# Altium footprint library LimeMicroAltiumLib.PcbLib: 876 footprints (part 17 of 57)
Each footprint in its own frame and in the unit in brackets; x right, y up, seen from the top. Pads: shape width x height; smd on the part's side, far side on the other; paste and mask are expansions set on the pad; w line width, h text height; cw(c..) or ccw(c..) is an arc to the next point about the centre after c.
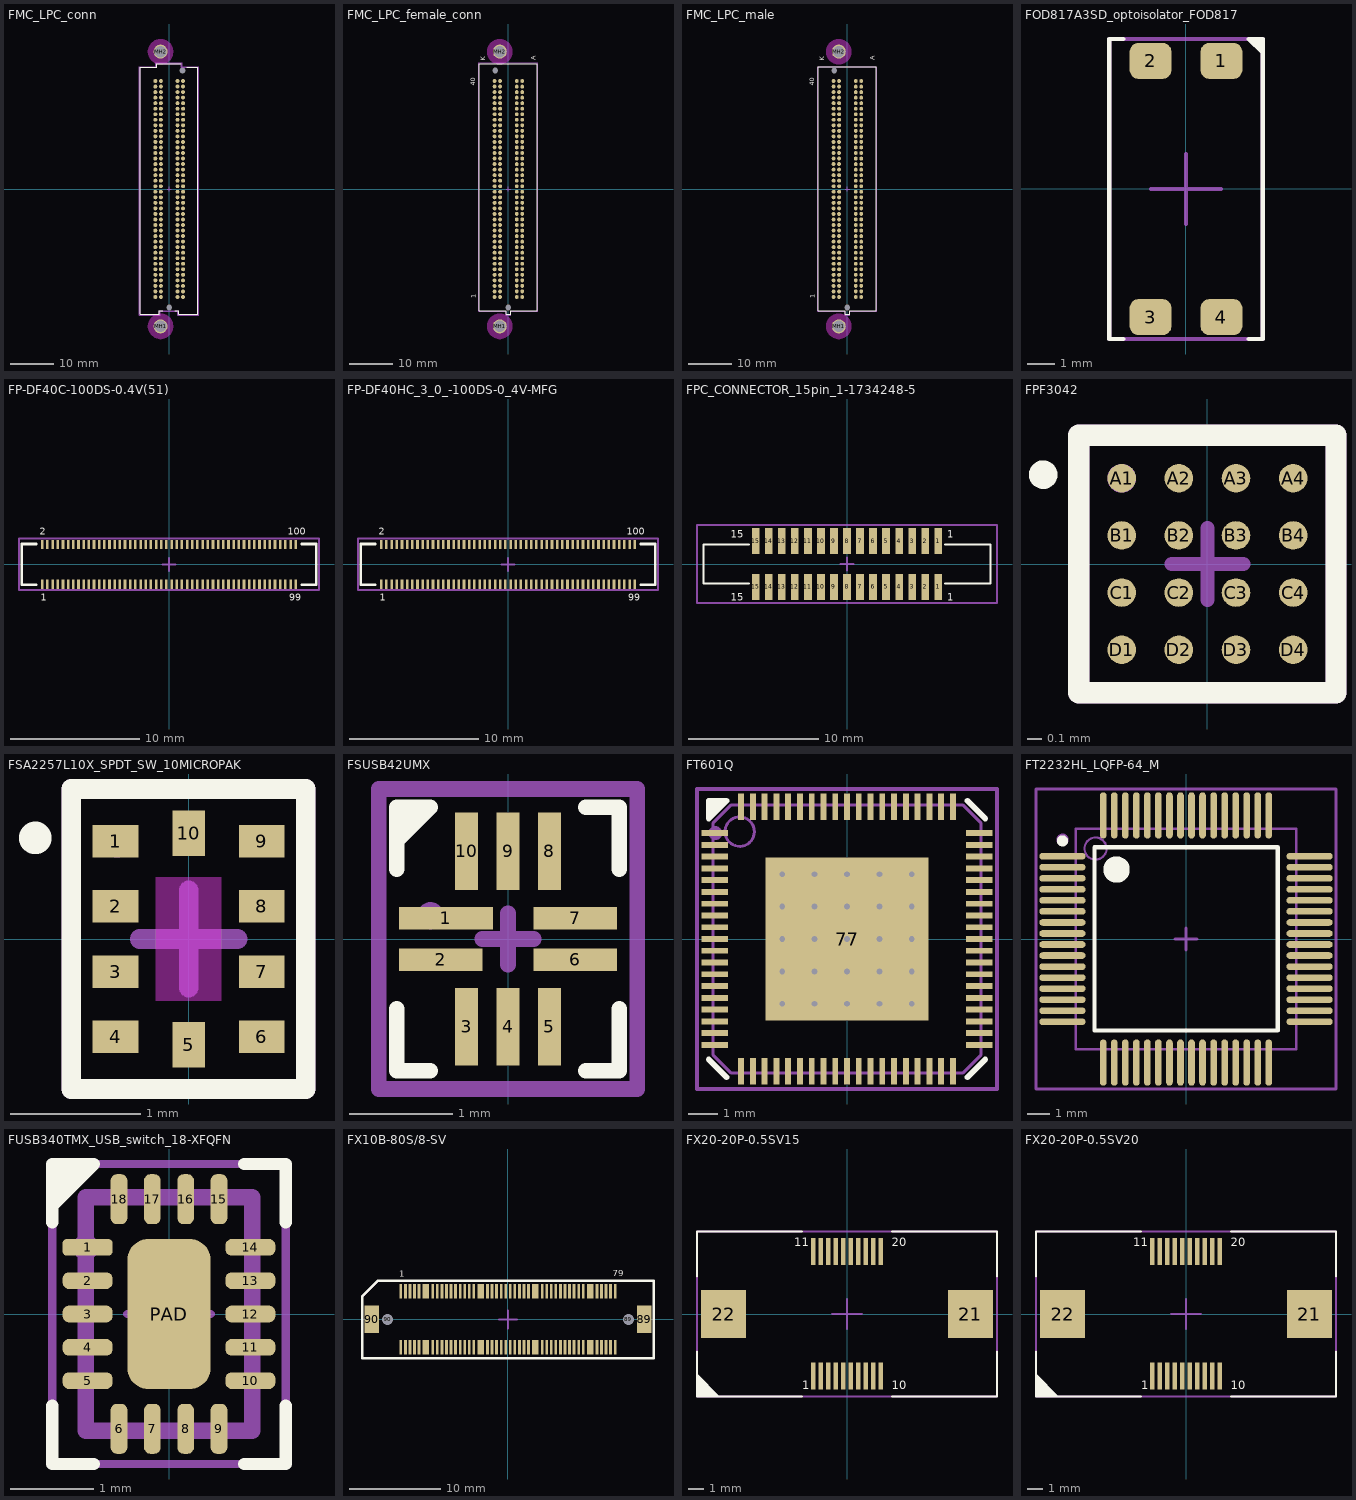
[diagram p16: the footprints below, top view; thin cyan lines are the x and y axes]

## FMC_LPC_conn [mm]
pads (164):
  round 0.9 smd: C1(3.175,24.765) C2(3.175,23.495) C3(3.175,22.225) C4(3.175,20.955) C5(3.175,19.685) C6(3.175,18.415) C7(3.175,17.145) C8(3.175,15.875) C9(3.175,14.605) C10(3.175,13.335) C11(3.175,12.065) C12(3.175,10.795) C13(3.175,9.525) C14(3.175,8.255) C15(3.175,6.985) C16(3.175,5.715) C17(3.175,4.445) C18(3.175,3.175) C19(3.175,1.905) C20(3.175,0.635) C21(3.175,-0.635) C22(3.175,-1.905) C23(3.175,-3.175) C24(3.175,-4.445) C25(3.175,-5.715) C26(3.175,-6.985) C27(3.175,-8.255) C28(3.175,-9.525) C29(3.175,-10.795) C30(3.175,-12.065) C31(3.175,-13.335) C32(3.175,-14.605) C33(3.175,-15.875) C34(3.175,-17.145) C35(3.175,-18.415) C36(3.175,-19.685) C37(3.175,-20.955) C38(3.175,-22.225) C39(3.175,-23.495) C40(3.175,-24.765) D1(1.905,24.765) D2(1.905,23.495) D3(1.905,22.225) D4(1.905,20.955) D5(1.905,19.685) D6(1.905,18.415) D7(1.905,17.145) D8(1.905,15.875) D9(1.905,14.605) D10(1.905,13.335) D11(1.905,12.065) D12(1.905,10.795) D13(1.905,9.525) D14(1.905,8.255) D15(1.905,6.985) D16(1.905,5.715) D17(1.905,4.445) D18(1.905,3.175) D19(1.905,1.905) D20(1.905,0.635) D21(1.905,-0.635) D22(1.905,-1.905) D23(1.905,-3.175) D24(1.905,-4.445) D25(1.905,-5.715) D26(1.905,-6.985) D27(1.905,-8.255) D28(1.905,-9.525) D29(1.905,-10.795) D30(1.905,-12.065) D31(1.905,-13.335) D32(1.905,-14.605) D33(1.905,-15.875) D34(1.905,-17.145) D35(1.905,-18.415) D36(1.905,-19.685) D37(1.905,-20.955) D38(1.905,-22.225) D39(1.905,-23.495) D40(1.905,-24.765) G1(-1.905,24.765) G2(-1.905,23.495) G3(-1.905,22.225) G4(-1.905,20.955) G5(-1.905,19.685) G6(-1.905,18.415) G7(-1.905,17.145) G8(-1.905,15.875) G9(-1.905,14.605) G10(-1.905,13.335) G11(-1.905,12.065) G12(-1.905,10.795) G13(-1.905,9.525) G14(-1.905,8.255) G15(-1.905,6.985) G16(-1.905,5.715) G17(-1.905,4.445) G18(-1.905,3.175) G19(-1.905,1.905) G20(-1.905,0.635) G21(-1.905,-0.635) G22(-1.905,-1.905) G23(-1.905,-3.175) G24(-1.905,-4.445) G25(-1.905,-5.715) G26(-1.905,-6.985) G27(-1.905,-8.255) G28(-1.905,-9.525) G29(-1.905,-10.795) G30(-1.905,-12.065) G31(-1.905,-13.335) G32(-1.905,-14.605) G33(-1.905,-15.875) G34(-1.905,-17.145) G35(-1.905,-18.415) G36(-1.905,-19.685) G37(-1.905,-20.955) G38(-1.905,-22.225) G39(-1.905,-23.495) G40(-1.905,-24.765) H1(-3.175,24.765) H2(-3.175,23.495) H3(-3.175,22.225) H4(-3.175,20.955) H5(-3.175,19.685) H6(-3.175,18.415) H7(-3.175,17.145) H8(-3.175,15.875) H9(-3.175,14.605) H10(-3.175,13.335) H11(-3.175,12.065) H12(-3.175,10.795) H13(-3.175,9.525) H14(-3.175,8.255) H15(-3.175,6.985) H16(-3.175,5.715) H17(-3.175,4.445) H18(-3.175,3.175) H19(-3.175,1.905) H20(-3.175,0.635) H21(-3.175,-0.635) H22(-3.175,-1.905) H23(-3.175,-3.175) H24(-3.175,-4.445) H25(-3.175,-5.715) H26(-3.175,-6.985) H27(-3.175,-8.255) H28(-3.175,-9.525) H29(-3.175,-10.795) H30(-3.175,-12.065) H31(-3.175,-13.335) H32(-3.175,-14.605) H33(-3.175,-15.875) H34(-3.175,-17.145) H35(-3.175,-18.415) H36(-3.175,-19.685) H37(-3.175,-20.955) H38(-3.175,-22.225) H39(-3.175,-23.495) H40(-3.175,-24.765)
  round 3.2 hole 2.7: MH1(-1.98,-31.5) MH2(-1.98,31.5)
  round 0.97 hole 1.27 unplated: MH1(0,-27.18) MH2(3.05,27.18)
Top Layer keep-out:
  region: -1.98,-34.4 -2.17,-34.4 -2.547,-34.35 -2.914,-34.252 -3.265,-34.107 -3.595,-33.916 -3.896,-33.685 -4.165,-33.416 -4.396,-33.115 -4.587,-32.785 -4.732,-32.434 -4.83,-32.067 -4.88,-31.69 -4.88,-31.5 -4.88,-31.31 -4.83,-30.933 -4.732,-30.566 -4.587,-30.215 -4.396,-29.885 -4.165,-29.584 -3.896,-29.315 -3.595,-29.084 -3.265,-28.893 -2.914,-28.748 -2.547,-28.65 -2.17,-28.6 -1.98,-28.6 -1.79,-28.6 -1.413,-28.65 -1.046,-28.748 -0.695,-28.893 -0.365,-29.084 -0.064,-29.315 0.205,-29.584 0.436,-29.885 0.627,-30.215 0.772,-30.566 0.87,-30.933 0.92,-31.31 0.92,-31.5 0.92,-31.69 0.87,-32.067 0.772,-32.434 0.627,-32.785 0.436,-33.115 0.205,-33.416 -0.064,-33.685 -0.365,-33.916 -0.695,-34.107 -1.046,-34.252 -1.413,-34.35 -1.79,-34.4
  region: -1.98,28.6 -2.17,28.6 -2.547,28.65 -2.914,28.748 -3.265,28.893 -3.595,29.084 -3.896,29.315 -4.165,29.584 -4.396,29.885 -4.587,30.215 -4.732,30.566 -4.83,30.933 -4.88,31.31 -4.88,31.5 -4.88,31.69 -4.83,32.067 -4.732,32.434 -4.587,32.785 -4.396,33.115 -4.165,33.416 -3.896,33.685 -3.595,33.916 -3.265,34.107 -2.914,34.252 -2.547,34.35 -2.17,34.4 -1.98,34.4 -1.79,34.4 -1.413,34.35 -1.046,34.252 -0.695,34.107 -0.365,33.916 -0.064,33.685 0.205,33.416 0.436,33.115 0.627,32.785 0.772,32.434 0.87,32.067 0.92,31.69 0.92,31.5 0.92,31.31 0.87,30.933 0.772,30.566 0.627,30.215 0.436,29.885 0.205,29.584 -0.064,29.315 -0.365,29.084 -0.695,28.893 -1.046,28.748 -1.413,28.65 -1.79,28.6
Top Overlay:
  lines w0.2: -6.662,-28.727 -6.662,27.89 ; -6.66,-28.727 -2.241,-28.727 -2.241,-27.889 -1.5,-27.889 ; -6.66,27.889 -2.888,27.889 -2.888,28.727 2.801,28.727 ; 1.25,-27.889 2.153,-27.889 2.153,-28.727 6.574,-28.727 ; 4,27.889 6.573,27.889 6.573,-28.727
Mechanical 13:
  lines w0.1: -6.662,-28.727 -6.662,27.89 ; -6.66,-28.727 -2.241,-28.727 -2.241,-27.889 2.153,-27.889 2.153,-28.727 6.574,-28.727 ; -6.66,27.889 -2.888,27.889 -2.888,28.727 2.801,28.727 2.801,27.889 6.573,27.889 6.573,-28.727
Mechanical 15:
  lines w0.15: -0.5,0 0.5,0 ; 0,-0.5 0,0.5 ; -6.862,-28.927 -2.041,-28.927 -2.041,-28.089 1.953,-28.089 1.953,-28.927 6.773,-28.927 6.773,28.089 3.001,28.089 3.001,28.927 -3.088,28.927 -3.088,28.089 -6.862,28.089 -6.862,-28.927
  text ".Designator" at 0,0 h0.55
3D body: height 2, standoff 0.25, extent -0.806,-27.889 0.718,-26.492
3D body: height 0.73, standoff -1.27, extent -0.61,-27.736 0.508,-26.62
3D body: height 6.55, standoff 2.16, extent 3.281,25.019 4.252,25.502
3D body: height 6.55, standoff 2.16, extent 3.281,23.749 4.252,24.511
3D body: height 6.55, standoff 2.16, extent 3.281,22.479 4.252,23.241
3D body: height 6.55, standoff 2.16, extent 3.281,21.209 4.252,21.971
3D body: height 6.55, standoff 2.16, extent 3.281,19.939 4.252,20.701
3D body: height 6.55, standoff 2.16, extent 3.281,18.669 4.252,19.431
3D body: height 6.55, standoff 2.16, extent 3.281,17.399 4.252,18.161
3D body: height 6.55, standoff 2.16, extent 3.281,16.129 4.252,16.891
3D body: height 6.55, standoff 2.16, extent 3.281,14.859 4.252,15.621
3D body: height 6.55, standoff 2.16, extent 3.281,13.589 4.252,14.351
3D body: height 6.55, standoff 2.16, extent 3.281,12.319 4.252,13.081
3D body: height 6.55, standoff 2.16, extent 3.281,11.049 4.252,11.811
3D body: height 6.55, standoff 2.16, extent 3.281,9.779 4.252,10.541
3D body: height 6.55, standoff 2.16, extent 3.281,8.509 4.252,9.271
3D body: height 6.55, standoff 2.16, extent 3.281,7.239 4.252,8.001
3D body: height 6.55, standoff 2.16, extent 3.281,5.969 4.252,6.731
3D body: height 6.55, standoff 2.16, extent 3.281,4.699 4.252,5.461
3D body: height 6.55, standoff 2.16, extent 3.281,3.429 4.252,4.191
3D body: height 6.55, standoff 2.16, extent 3.281,2.159 4.252,2.921
3D body: height 6.55, standoff 2.16, extent 3.281,0.889 4.252,1.651
3D body: height 6.55, standoff 2.16, extent 3.281,-0.381 4.252,0.381
3D body: height 6.55, standoff 2.16, extent 3.281,-1.651 4.252,-0.889
3D body: height 6.55, standoff 2.16, extent 3.281,-2.921 4.252,-2.159
3D body: height 6.55, standoff 2.16, extent 3.281,-4.191 4.252,-3.429
3D body: height 6.55, standoff 2.16, extent 3.281,-5.461 4.252,-4.699
3D body: height 6.55, standoff 2.16, extent 3.281,-6.731 4.252,-5.969
3D body: height 6.55, standoff 2.16, extent 3.281,-8.001 4.252,-7.239
3D body: height 6.55, standoff 2.16, extent 3.281,-9.271 4.252,-8.509
3D body: height 6.55, standoff 2.16, extent 3.281,-10.541 4.252,-9.779
3D body: height 6.55, standoff 2.16, extent 3.281,-11.811 4.252,-11.049
3D body: height 6.55, standoff 2.16, extent 3.281,-13.081 4.252,-12.319
3D body: height 6.55, standoff 2.16, extent 3.281,-14.351 4.252,-13.589
3D body: height 6.55, standoff 2.16, extent 3.281,-15.621 4.252,-14.859
3D body: height 6.55, standoff 2.16, extent 3.281,-16.891 4.252,-16.129
3D body: height 6.55, standoff 2.16, extent 3.281,-18.161 4.252,-17.399
3D body: height 6.55, standoff 2.16, extent 3.281,-19.431 4.252,-18.669
3D body: height 6.55, standoff 2.16, extent 3.281,-20.701 4.252,-19.939
3D body: height 6.55, standoff 2.16, extent 3.281,-21.971 4.252,-21.209
3D body: height 6.55, standoff 2.16, extent 3.281,-23.241 4.252,-22.479
3D body: height 6.55, standoff 2.16, extent 3.281,-24.511 4.252,-23.749
3D body: height 2, standoff 0.51, extent -5.771,26.493 -3.853,27.255
3D body: height 2, standoff 0.51, extent 3.766,26.492 5.685,27.254
3D body: height 2, standoff 0, extent -3.854,26.492 -2.33,27.889
3D body: height 2, standoff 0, extent -0.806,26.492 0.718,27.889
3D body: height 2, standoff 0.25, extent 2.242,26.492 3.766,27.889
3D body: height 6.55, standoff 1.92, extent -6.662,27.053 6.571,28.729
3D body: height 2, standoff 0.51, extent -6.279,-27.889 5.684,-26.492
3D body: height 6.55, standoff 0, extent 5.685,-27.889 6.573,-26.493
3D body: height 2, standoff 0, extent 2.242,-27.889 3.766,-26.492
3D body: height 2, standoff 0, extent -3.854,-27.889 -2.33,-26.492
3D body: height 6.55, standoff 0, extent -6.66,-27.889 -5.772,-26.493
3D body: height 6.55, standoff 1.92, extent -6.659,-28.727 6.574,-27.052
3D body: height 6.55, standoff 0, extent 5.685,26.493 6.573,27.889
3D body: height 6.55, standoff 0, extent -6.662,26.494 -5.774,27.89
3D body: height 2, standoff 0.51, extent -3.854,26.492 3.766,27.889
3D body: height 6.55, standoff 2.16, extent 3.281,-25.502 4.252,-25.019
3D body: height 6.55, standoff 2.16, extent 0.741,-25.502 1.712,-25.019
3D body: height 6.55, standoff 2.16, extent 0.741,-24.511 1.712,-23.749
3D body: height 6.55, standoff 2.16, extent 0.741,-23.241 1.712,-22.479
3D body: height 6.55, standoff 2.16, extent 0.741,-21.971 1.712,-21.209
3D body: height 6.55, standoff 2.16, extent 0.741,-20.701 1.712,-19.939
3D body: height 6.55, standoff 2.16, extent 0.741,-19.431 1.712,-18.669
3D body: height 6.55, standoff 2.16, extent 0.741,-18.161 1.712,-17.399
3D body: height 6.55, standoff 2.16, extent 0.741,-16.891 1.712,-16.129
3D body: height 6.55, standoff 2.16, extent 0.741,-15.621 1.712,-14.859
3D body: height 6.55, standoff 2.16, extent 0.741,-14.351 1.712,-13.589
3D body: height 6.55, standoff 2.16, extent 0.741,-13.081 1.712,-12.319
3D body: height 6.55, standoff 2.16, extent 0.741,-11.811 1.712,-11.049
3D body: height 6.55, standoff 2.16, extent 0.741,-10.541 1.712,-9.779
3D body: height 6.55, standoff 2.16, extent 0.741,-9.271 1.712,-8.509
3D body: height 6.55, standoff 2.16, extent 0.741,-8.001 1.712,-7.239
3D body: height 6.55, standoff 2.16, extent 0.741,-6.731 1.712,-5.969
3D body: height 6.55, standoff 2.16, extent 0.741,-5.461 1.712,-4.699
3D body: height 6.55, standoff 2.16, extent 0.741,-4.191 1.712,-3.429
3D body: height 6.55, standoff 2.16, extent 0.741,-2.921 1.712,-2.159
3D body: height 6.55, standoff 2.16, extent 0.741,-1.651 1.712,-0.889
3D body: height 6.55, standoff 2.16, extent 0.741,-0.381 1.712,0.381
3D body: height 6.55, standoff 2.16, extent 0.741,0.889 1.712,1.651
3D body: height 6.55, standoff 2.16, extent 0.741,2.159 1.712,2.921
3D body: height 6.55, standoff 2.16, extent 0.741,3.429 1.712,4.191
3D body: height 6.55, standoff 2.16, extent 0.741,4.699 1.712,5.461
3D body: height 6.55, standoff 2.16, extent 0.741,5.969 1.712,6.731
3D body: height 6.55, standoff 2.16, extent 0.741,7.239 1.712,8.001
3D body: height 6.55, standoff 2.16, extent 0.741,8.509 1.712,9.271
3D body: height 6.55, standoff 2.16, extent 0.741,9.779 1.712,10.541
3D body: height 6.55, standoff 2.16, extent 0.741,11.049 1.712,11.811
3D body: height 6.55, standoff 2.16, extent 0.741,12.319 1.712,13.081
3D body: height 6.55, standoff 2.16, extent 0.741,13.589 1.712,14.351
3D body: height 6.55, standoff 2.16, extent 0.741,14.859 1.712,15.621
3D body: height 6.55, standoff 2.16, extent 0.741,16.129 1.712,16.891
3D body: height 6.55, standoff 2.16, extent 0.741,17.399 1.712,18.161
3D body: height 6.55, standoff 2.16, extent 0.741,18.669 1.712,19.431
3D body: height 6.55, standoff 2.16, extent 0.741,19.939 1.712,20.701
3D body: height 6.55, standoff 2.16, extent 0.741,21.209 1.712,21.971
3D body: height 6.55, standoff 2.16, extent 0.741,22.479 1.712,23.241
3D body: height 6.55, standoff 2.16, extent 0.741,23.749 1.712,24.511
3D body: height 6.55, standoff 2.16, extent 0.741,25.019 1.712,25.502
3D body: height 6.24, standoff 2.16, extent 1.157,-25.019 1.296,25.019
3D body: height 6.55, standoff 2.16, extent -1.799,-25.502 -0.828,-25.019
3D body: height 6.55, standoff 2.16, extent -1.799,-24.511 -0.828,-23.749
3D body: height 6.55, standoff 2.16, extent -1.799,-23.241 -0.828,-22.479
3D body: height 6.55, standoff 2.16, extent -1.799,-21.971 -0.828,-21.209
3D body: height 6.55, standoff 2.16, extent -1.799,-20.701 -0.828,-19.939
3D body: height 6.55, standoff 2.16, extent -1.799,-19.431 -0.828,-18.669
3D body: height 6.55, standoff 2.16, extent -1.799,-18.161 -0.828,-17.399
3D body: height 6.55, standoff 2.16, extent -1.799,-16.891 -0.828,-16.129
3D body: height 6.55, standoff 2.16, extent -1.799,-15.621 -0.828,-14.859
3D body: height 6.55, standoff 2.16, extent -1.799,-14.351 -0.828,-13.589
3D body: height 6.55, standoff 2.16, extent -1.799,-13.081 -0.828,-12.319
3D body: height 6.55, standoff 2.16, extent -1.799,-11.811 -0.828,-11.049
3D body: height 6.55, standoff 2.16, extent -1.799,-10.541 -0.828,-9.779
3D body: height 6.55, standoff 2.16, extent -1.799,-9.271 -0.828,-8.509
3D body: height 6.55, standoff 2.16, extent -1.799,-8.001 -0.828,-7.239
3D body: height 6.55, standoff 2.16, extent -1.799,-6.731 -0.828,-5.969
3D body: height 6.55, standoff 2.16, extent -1.799,-5.461 -0.828,-4.699
3D body: height 6.55, standoff 2.16, extent -1.799,-4.191 -0.828,-3.429
3D body: height 6.55, standoff 2.16, extent -1.799,-2.921 -0.828,-2.159
3D body: height 6.55, standoff 2.16, extent -1.799,-1.651 -0.828,-0.889
3D body: height 6.55, standoff 2.16, extent -1.799,-0.381 -0.828,0.381
3D body: height 6.55, standoff 2.16, extent -1.799,0.889 -0.828,1.651
3D body: height 6.55, standoff 2.16, extent -1.799,2.159 -0.828,2.921
3D body: height 6.55, standoff 2.16, extent -1.799,3.429 -0.828,4.191
3D body: height 6.55, standoff 2.16, extent -1.799,4.699 -0.828,5.461
3D body: height 6.55, standoff 2.16, extent -1.799,5.969 -0.828,6.731
3D body: height 6.55, standoff 2.16, extent -1.799,7.239 -0.828,8.001
3D body: height 6.55, standoff 2.16, extent -1.799,8.509 -0.828,9.271
3D body: height 6.55, standoff 2.16, extent -1.799,9.779 -0.828,10.541
3D body: height 6.55, standoff 2.16, extent -1.799,11.049 -0.828,11.811
3D body: height 6.55, standoff 2.16, extent -1.799,12.319 -0.828,13.081
3D body: height 6.55, standoff 2.16, extent -1.799,13.589 -0.828,14.351
3D body: height 6.55, standoff 2.16, extent -1.799,14.859 -0.828,15.621
3D body: height 6.55, standoff 2.16, extent -1.799,16.129 -0.828,16.891
3D body: height 6.55, standoff 2.16, extent -1.799,17.399 -0.828,18.161
3D body: height 6.55, standoff 2.16, extent -1.799,18.669 -0.828,19.431
3D body: height 6.55, standoff 2.16, extent -1.799,19.939 -0.828,20.701
3D body: height 6.55, standoff 2.16, extent -1.799,21.209 -0.828,21.971
3D body: height 6.55, standoff 2.16, extent -1.799,22.479 -0.828,23.241
3D body: height 6.55, standoff 2.16, extent -1.799,23.749 -0.828,24.511
3D body: height 6.55, standoff 2.16, extent -1.799,25.019 -0.828,25.502
3D body: height 6.24, standoff 2.16, extent -1.383,-25.019 -1.244,25.019
3D body: height 6.55, standoff 2.16, extent -4.339,-25.502 -3.368,-25.019
3D body: height 6.55, standoff 2.16, extent -4.339,-24.511 -3.368,-23.749
3D body: height 6.55, standoff 2.16, extent -4.339,-23.241 -3.368,-22.479
3D body: height 6.55, standoff 2.16, extent -4.339,-21.971 -3.368,-21.209
3D body: height 6.55, standoff 2.16, extent -4.339,-20.701 -3.368,-19.939
3D body: height 6.55, standoff 2.16, extent -4.339,-19.431 -3.368,-18.669
3D body: height 6.55, standoff 2.16, extent -4.339,-18.161 -3.368,-17.399
3D body: height 6.55, standoff 2.16, extent -4.339,-16.891 -3.368,-16.129
3D body: height 6.55, standoff 2.16, extent -4.339,-15.621 -3.368,-14.859
3D body: height 6.55, standoff 2.16, extent -4.339,-14.351 -3.368,-13.589
3D body: height 6.55, standoff 2.16, extent -4.339,-13.081 -3.368,-12.319
3D body: height 6.55, standoff 2.16, extent -4.339,-11.811 -3.368,-11.049
3D body: height 6.55, standoff 2.16, extent -4.339,-10.541 -3.368,-9.779
3D body: height 6.55, standoff 2.16, extent -4.339,-9.271 -3.368,-8.509
3D body: height 6.55, standoff 2.16, extent -4.339,-8.001 -3.368,-7.239
3D body: height 6.55, standoff 2.16, extent -4.339,-6.731 -3.368,-5.969
3D body: height 6.55, standoff 2.16, extent -4.339,-5.461 -3.368,-4.699
3D body: height 6.55, standoff 2.16, extent -4.339,-4.191 -3.368,-3.429
3D body: height 6.55, standoff 2.16, extent -4.339,-2.921 -3.368,-2.159
3D body: height 6.55, standoff 2.16, extent -4.339,-1.651 -3.368,-0.889
3D body: height 6.55, standoff 2.16, extent -4.339,-0.381 -3.368,0.381
3D body: height 6.55, standoff 2.16, extent -4.339,0.889 -3.368,1.651
3D body: height 6.55, standoff 2.16, extent -4.339,2.159 -3.368,2.921
3D body: height 6.55, standoff 2.16, extent -4.339,3.429 -3.368,4.191
3D body: height 6.55, standoff 2.16, extent -4.339,4.699 -3.368,5.461
3D body: height 6.55, standoff 2.16, extent -4.339,5.969 -3.368,6.731
3D body: height 6.55, standoff 2.16, extent -4.339,7.239 -3.368,8.001
3D body: height 6.55, standoff 2.16, extent -4.339,8.509 -3.368,9.271
3D body: height 6.55, standoff 2.16, extent -4.339,9.779 -3.368,10.541
3D body: height 6.55, standoff 2.16, extent -4.339,11.049 -3.368,11.811
3D body: height 6.55, standoff 2.16, extent -4.339,12.319 -3.368,13.081
3D body: height 6.55, standoff 2.16, extent -4.339,13.589 -3.368,14.351
3D body: height 6.55, standoff 2.16, extent -4.339,14.859 -3.368,15.621
3D body: height 6.55, standoff 2.16, extent -4.339,16.129 -3.368,16.891
3D body: height 6.55, standoff 2.16, extent -4.339,17.399 -3.368,18.161
3D body: height 6.55, standoff 2.16, extent -4.339,18.669 -3.368,19.431
3D body: height 6.55, standoff 2.16, extent -4.339,19.939 -3.368,20.701
3D body: height 6.55, standoff 2.16, extent -4.339,21.209 -3.368,21.971
3D body: height 6.55, standoff 2.16, extent -4.339,22.479 -3.368,23.241
3D body: height 6.55, standoff 2.16, extent -4.339,23.749 -3.368,24.511
3D body: height 6.55, standoff 2.16, extent -4.339,25.019 -3.368,25.502
3D body: height 6.24, standoff 2.16, extent -3.923,-25.019 -3.784,25.019
3D body: height 3.51, standoff 1.92, extent -6.659,-28.728 6.576,28.728
3D body: height 2, standoff -1.27, extent 2.503,26.74 3.597,27.619
3D body: height 6.55, standoff 2.16, extent 5.812,-28.727 6.577,27.891
3D body: height 6.55, standoff 2.16, extent -6.662,-28.727 -5.897,27.89
3D body: height 6.24, standoff 2.16, extent 3.697,-25.019 3.836,25.019

## FMC_LPC_female_conn [mm]
pads (164):
  round 0.9 smd: C1(3.175,-24.765) C2(3.175,-23.495) C3(3.175,-22.225) C4(3.175,-20.955) C5(3.175,-19.685) C6(3.175,-18.415) C7(3.175,-17.145) C8(3.175,-15.875) C9(3.175,-14.605) C10(3.175,-13.335) C11(3.175,-12.065) C12(3.175,-10.795) C13(3.175,-9.525) C14(3.175,-8.255) C15(3.175,-6.985) C16(3.175,-5.715) C17(3.175,-4.445) C18(3.175,-3.175) C19(3.175,-1.905) C20(3.175,-0.635) C21(3.175,0.635) C22(3.175,1.905) C23(3.175,3.175) C24(3.175,4.445) C25(3.175,5.715) C26(3.175,6.985) C27(3.175,8.255) C28(3.175,9.525) C29(3.175,10.795) C30(3.175,12.065) C31(3.175,13.335) C32(3.175,14.605) C33(3.175,15.875) C34(3.175,17.145) C35(3.175,18.415) C36(3.175,19.685) C37(3.175,20.955) C38(3.175,22.225) C39(3.175,23.495) C40(3.175,24.765) D1(1.905,-24.765) D2(1.905,-23.495) D3(1.905,-22.225) D4(1.905,-20.955) D5(1.905,-19.685) D6(1.905,-18.415) D7(1.905,-17.145) D8(1.905,-15.875) D9(1.905,-14.605) D10(1.905,-13.335) D11(1.905,-12.065) D12(1.905,-10.795) D13(1.905,-9.525) D14(1.905,-8.255) D15(1.905,-6.985) D16(1.905,-5.715) D17(1.905,-4.445) D18(1.905,-3.175) D19(1.905,-1.905) D20(1.905,-0.635) D21(1.905,0.635) D22(1.905,1.905) D23(1.905,3.175) D24(1.905,4.445) D25(1.905,5.715) D26(1.905,6.985) D27(1.905,8.255) D28(1.905,9.525) D29(1.905,10.795) D30(1.905,12.065) D31(1.905,13.335) D32(1.905,14.605) D33(1.905,15.875) D34(1.905,17.145) D35(1.905,18.415) D36(1.905,19.685) D37(1.905,20.955) D38(1.905,22.225) D39(1.905,23.495) D40(1.905,24.765) G1(-1.905,-24.765) G2(-1.905,-23.495) G3(-1.905,-22.225) G4(-1.905,-20.955) G5(-1.905,-19.685) G6(-1.905,-18.415) G7(-1.905,-17.145) G8(-1.905,-15.875) G9(-1.905,-14.605) G10(-1.905,-13.335) G11(-1.905,-12.065) G12(-1.905,-10.795) G13(-1.905,-9.525) G14(-1.905,-8.255) G15(-1.905,-6.985) G16(-1.905,-5.715) G17(-1.905,-4.445) G18(-1.905,-3.175) G19(-1.905,-1.905) G20(-1.905,-0.635) G21(-1.905,0.635) G22(-1.905,1.905) G23(-1.905,3.175) G24(-1.905,4.445) G25(-1.905,5.715) G26(-1.905,6.985) G27(-1.905,8.255) G28(-1.905,9.525) G29(-1.905,10.795) G30(-1.905,12.065) G31(-1.905,13.335) G32(-1.905,14.605) G33(-1.905,15.875) G34(-1.905,17.145) G35(-1.905,18.415) G36(-1.905,19.685) G37(-1.905,20.955) G38(-1.905,22.225) G39(-1.905,23.495) G40(-1.905,24.765) H1(-3.175,-24.765) H2(-3.175,-23.495) H3(-3.175,-22.225) H4(-3.175,-20.955) H5(-3.175,-19.685) H6(-3.175,-18.415) H7(-3.175,-17.145) H8(-3.175,-15.875) H9(-3.175,-14.605) H10(-3.175,-13.335) H11(-3.175,-12.065) H12(-3.175,-10.795) H13(-3.175,-9.525) H14(-3.175,-8.255) H15(-3.175,-6.985) H16(-3.175,-5.715) H17(-3.175,-4.445) H18(-3.175,-3.175) H19(-3.175,-1.905) H20(-3.175,-0.635) H21(-3.175,0.635) H22(-3.175,1.905) H23(-3.175,3.175) H24(-3.175,4.445) H25(-3.175,5.715) H26(-3.175,6.985) H27(-3.175,8.255) H28(-3.175,9.525) H29(-3.175,10.795) H30(-3.175,12.065) H31(-3.175,13.335) H32(-3.175,14.605) H33(-3.175,15.875) H34(-3.175,17.145) H35(-3.175,18.415) H36(-3.175,19.685) H37(-3.175,20.955) H38(-3.175,22.225) H39(-3.175,23.495) H40(-3.175,24.765)
  round 3.2 hole 2.7: MH1(-1.98,-31.5) MH2(-1.98,31.5)
  round 0.97 hole 1.27 unplated: MH1(0,-27.18) MH2(-3.05,27.18)
Top Layer keep-out:
  region: -1.98,-34.4 -2.17,-34.4 -2.547,-34.35 -2.914,-34.252 -3.265,-34.107 -3.595,-33.916 -3.896,-33.685 -4.165,-33.416 -4.396,-33.115 -4.587,-32.785 -4.732,-32.434 -4.83,-32.067 -4.88,-31.69 -4.88,-31.5 -4.88,-31.31 -4.83,-30.933 -4.732,-30.566 -4.587,-30.215 -4.396,-29.885 -4.165,-29.584 -3.896,-29.315 -3.595,-29.084 -3.265,-28.893 -2.914,-28.748 -2.547,-28.65 -2.17,-28.6 -1.98,-28.6 -1.79,-28.6 -1.413,-28.65 -1.046,-28.748 -0.695,-28.893 -0.365,-29.084 -0.064,-29.315 0.205,-29.584 0.436,-29.885 0.627,-30.215 0.772,-30.566 0.87,-30.933 0.92,-31.31 0.92,-31.5 0.92,-31.69 0.87,-32.067 0.772,-32.434 0.627,-32.785 0.436,-33.115 0.205,-33.416 -0.064,-33.685 -0.365,-33.916 -0.695,-34.107 -1.046,-34.252 -1.413,-34.35 -1.79,-34.4
  region: -1.98,28.6 -2.17,28.6 -2.547,28.65 -2.914,28.748 -3.265,28.893 -3.595,29.084 -3.896,29.315 -4.165,29.584 -4.396,29.885 -4.587,30.215 -4.732,30.566 -4.83,30.933 -4.88,31.31 -4.88,31.5 -4.88,31.69 -4.83,32.067 -4.732,32.434 -4.587,32.785 -4.396,33.115 -4.165,33.416 -3.896,33.685 -3.595,33.916 -3.265,34.107 -2.914,34.252 -2.547,34.35 -2.17,34.4 -1.98,34.4 -1.79,34.4 -1.413,34.35 -1.046,34.252 -0.695,34.107 -0.365,33.916 -0.064,33.685 0.205,33.416 0.436,33.115 0.627,32.785 0.772,32.434 0.87,32.067 0.92,31.69 0.92,31.5 0.92,31.31 0.87,30.933 0.772,30.566 0.627,30.215 0.436,29.885 0.205,29.584 -0.064,29.315 -0.365,29.084 -0.695,28.893 -1.046,28.748 -1.413,28.65 -1.79,28.6
Top Overlay:
  lines w0.2: -6.662,-27.89 -6.662,28.727 ; -6.66,-27.889 -0.5,-27.889 -0.5,-28.727 0.5,-28.727 0.5,-27.9 0.511,-27.889 4,-27.889 6.573,-27.889 6.573,28.727 ; -6.66,28.727 2.153,28.727 6.574,28.727
  text "40" at -7.6,23.7 h1.1
  text "1" at -7.5,-25 h1.1
  text "A" at 6.3,29.5 h1.1
  text "K" at -5.3,29.375 h1.1
Mechanical 15:
  lines w0.15: -0.5,0 0.5,0 ; 0,-0.5 0,0.5 ; -6.862,-28.089 -0.5,-28.089 -0.5,-28.927 0.5,-28.927 0.5,-28.089 6.773,-28.089 6.773,28.927 1.953,28.927 -2.041,28.927 -6.862,28.927 -6.862,-28.089
  text ".Designator" at 0,0 h0.55
  text "K" at -4.05,26.225 h1.1
  text "A" at 4.65,25.875 h1.1
  text "1" at -4.4,-24.9 h1.1
  text "40" at -4.6,23.6 h1.1

## FMC_LPC_male [mm]
pads (164):
  round 0.9 smd: C1(3.175,-24.765) C2(3.175,-23.495) C3(3.175,-22.225) C4(3.175,-20.955) C5(3.175,-19.685) C6(3.175,-18.415) C7(3.175,-17.145) C8(3.175,-15.875) C9(3.175,-14.605) C10(3.175,-13.335) C11(3.175,-12.065) C12(3.175,-10.795) C13(3.175,-9.525) C14(3.175,-8.255) C15(3.175,-6.985) C16(3.175,-5.715) C17(3.175,-4.445) C18(3.175,-3.175) C19(3.175,-1.905) C20(3.175,-0.635) C21(3.175,0.635) C22(3.175,1.905) C23(3.175,3.175) C24(3.175,4.445) C25(3.175,5.715) C26(3.175,6.985) C27(3.175,8.255) C28(3.175,9.525) C29(3.175,10.795) C30(3.175,12.065) C31(3.175,13.335) C32(3.175,14.605) C33(3.175,15.875) C34(3.175,17.145) C35(3.175,18.415) C36(3.175,19.685) C37(3.175,20.955) C38(3.175,22.225) C39(3.175,23.495) C40(3.175,24.765) D1(1.905,-24.765) D2(1.905,-23.495) D3(1.905,-22.225) D4(1.905,-20.955) D5(1.905,-19.685) D6(1.905,-18.415) D7(1.905,-17.145) D8(1.905,-15.875) D9(1.905,-14.605) D10(1.905,-13.335) D11(1.905,-12.065) D12(1.905,-10.795) D13(1.905,-9.525) D14(1.905,-8.255) D15(1.905,-6.985) D16(1.905,-5.715) D17(1.905,-4.445) D18(1.905,-3.175) D19(1.905,-1.905) D20(1.905,-0.635) D21(1.905,0.635) D22(1.905,1.905) D23(1.905,3.175) D24(1.905,4.445) D25(1.905,5.715) D26(1.905,6.985) D27(1.905,8.255) D28(1.905,9.525) D29(1.905,10.795) D30(1.905,12.065) D31(1.905,13.335) D32(1.905,14.605) D33(1.905,15.875) D34(1.905,17.145) D35(1.905,18.415) D36(1.905,19.685) D37(1.905,20.955) D38(1.905,22.225) D39(1.905,23.495) D40(1.905,24.765) G1(-1.905,-24.765) G2(-1.905,-23.495) G3(-1.905,-22.225) G4(-1.905,-20.955) G5(-1.905,-19.685) G6(-1.905,-18.415) G7(-1.905,-17.145) G8(-1.905,-15.875) G9(-1.905,-14.605) G10(-1.905,-13.335) G11(-1.905,-12.065) G12(-1.905,-10.795) G13(-1.905,-9.525) G14(-1.905,-8.255) G15(-1.905,-6.985) G16(-1.905,-5.715) G17(-1.905,-4.445) G18(-1.905,-3.175) G19(-1.905,-1.905) G20(-1.905,-0.635) G21(-1.905,0.635) G22(-1.905,1.905) G23(-1.905,3.175) G24(-1.905,4.445) G25(-1.905,5.715) G26(-1.905,6.985) G27(-1.905,8.255) G28(-1.905,9.525) G29(-1.905,10.795) G30(-1.905,12.065) G31(-1.905,13.335) G32(-1.905,14.605) G33(-1.905,15.875) G34(-1.905,17.145) G35(-1.905,18.415) G36(-1.905,19.685) G37(-1.905,20.955) G38(-1.905,22.225) G39(-1.905,23.495) G40(-1.905,24.765) H1(-3.175,-24.765) H2(-3.175,-23.495) H3(-3.175,-22.225) H4(-3.175,-20.955) H5(-3.175,-19.685) H6(-3.175,-18.415) H7(-3.175,-17.145) H8(-3.175,-15.875) H9(-3.175,-14.605) H10(-3.175,-13.335) H11(-3.175,-12.065) H12(-3.175,-10.795) H13(-3.175,-9.525) H14(-3.175,-8.255) H15(-3.175,-6.985) H16(-3.175,-5.715) H17(-3.175,-4.445) H18(-3.175,-3.175) H19(-3.175,-1.905) H20(-3.175,-0.635) H21(-3.175,0.635) H22(-3.175,1.905) H23(-3.175,3.175) H24(-3.175,4.445) H25(-3.175,5.715) H26(-3.175,6.985) H27(-3.175,8.255) H28(-3.175,9.525) H29(-3.175,10.795) H30(-3.175,12.065) H31(-3.175,13.335) H32(-3.175,14.605) H33(-3.175,15.875) H34(-3.175,17.145) H35(-3.175,18.415) H36(-3.175,19.685) H37(-3.175,20.955) H38(-3.175,22.225) H39(-3.175,23.495) H40(-3.175,24.765)
  round 3.2 hole 2.7: MH1(-1.98,-31.5) MH2(-1.98,31.5)
  round 0.97 hole 1.27 unplated: MH1(0,-27.18) MH2(-3.05,27.18)
Top Layer keep-out:
  region: -1.98,28.6 -2.17,28.6 -2.547,28.65 -2.914,28.748 -3.265,28.893 -3.595,29.084 -3.896,29.315 -4.165,29.584 -4.396,29.885 -4.587,30.215 -4.732,30.566 -4.83,30.933 -4.88,31.31 -4.88,31.5 -4.88,31.69 -4.83,32.067 -4.732,32.434 -4.587,32.785 -4.396,33.115 -4.165,33.416 -3.896,33.685 -3.595,33.916 -3.265,34.107 -2.914,34.252 -2.547,34.35 -2.17,34.4 -1.98,34.4 -1.79,34.4 -1.413,34.35 -1.046,34.252 -0.695,34.107 -0.365,33.916 -0.064,33.685 0.205,33.416 0.436,33.115 0.627,32.785 0.772,32.434 0.87,32.067 0.92,31.69 0.92,31.5 0.92,31.31 0.87,30.933 0.772,30.566 0.627,30.215 0.436,29.885 0.205,29.584 -0.064,29.315 -0.365,29.084 -0.695,28.893 -1.046,28.748 -1.413,28.65 -1.79,28.6
  region: -1.98,-34.4 -2.17,-34.4 -2.547,-34.35 -2.914,-34.252 -3.265,-34.107 -3.595,-33.916 -3.896,-33.685 -4.165,-33.416 -4.396,-33.115 -4.587,-32.785 -4.732,-32.434 -4.83,-32.067 -4.88,-31.69 -4.88,-31.5 -4.88,-31.31 -4.83,-30.933 -4.732,-30.566 -4.587,-30.215 -4.396,-29.885 -4.165,-29.584 -3.896,-29.315 -3.595,-29.084 -3.265,-28.893 -2.914,-28.748 -2.547,-28.65 -2.17,-28.6 -1.98,-28.6 -1.79,-28.6 -1.413,-28.65 -1.046,-28.748 -0.695,-28.893 -0.365,-29.084 -0.064,-29.315 0.205,-29.584 0.436,-29.885 0.627,-30.215 0.772,-30.566 0.87,-30.933 0.92,-31.31 0.92,-31.5 0.92,-31.69 0.87,-32.067 0.772,-32.434 0.627,-32.785 0.436,-33.115 0.205,-33.416 -0.064,-33.685 -0.365,-33.916 -0.695,-34.107 -1.046,-34.252 -1.413,-34.35 -1.79,-34.4
Top Overlay:
  lines w0.2: -6.662,-27.89 -6.662,28.025 1.451,28.025 6.573,28.025 6.573,-27.889 4,-27.889 0.511,-27.889 0.5,-27.9 0.5,-28.727 -0.5,-28.727 -0.5,-27.889 -6.66,-27.889
  text "K" at -5.3,29.375 h1.1
  text "A" at 6.3,29.5 h1.1
  text "1" at -7.5,-25 h1.1
  text "40" at -7.6,23.7 h1.1
Mechanical 15:
  lines w0.15: -0.5,0 0.5,0 ; 0,-0.5 0,0.5 ; -6.862,-28.089 -6.862,28 6.773,28 6.773,-28.089 0.5,-28.089 0.5,-28.927 -0.5,-28.927 -0.5,-28.089 -6.862,-28.089
  text "40" at -4.6,23.6 h1.1
  text "1" at -4.4,-24.9 h1.1
  text "A" at 4.65,25.875 h1.1
  text "K" at -4.05,26.225 h1.1
  text ".Designator" at 0,0 h0.55
3D body "SEAM-40-02.0-L-10-2-A.STEP": height 5.76, standoff -1.12, extent -7.456,-27.864 7.225,27.914

## FOD817A3SD_optoisolator_FOD817 [mm]
pads (4):
  rrect50% 1.5x1.3 smd mask+0.05: 1(1.27,4.59) 2(-1.27,4.59) 3(-1.27,-4.59) 4(1.27,-4.59)
Top Overlay:
  region: 2.2,5.375 2.75,4.825 2.75,5.375
  lines w0.15: -2.25,-5.375 -2.75,-5.375 -2.75,5.375 -2.25,5.375 ; 2.25,-5.375 2.75,-5.375 2.75,5.375 2.25,5.375 2.738,4.887
Mechanical 15:
  lines w0.15: -1.25,0 0,0 ; 0,-1.25 0,0 ; 0,1.25 0,0 ; 1.25,0 0,0 ; -2.75,-5.375 2.75,-5.375 2.75,5.375 -2.75,5.375 -2.75,-5.375
  text ".Designator" at 0,0 h0.55
  text "1" at 1,4 h0.55
  text "4" at 1,-5 h0.55
3D body: height 4, standoff 0, extent -2.5,-4.5 2.5,4.5

## FP-DF40C-100DS-0.4V(51) [mm]
pads (100):
  rect 0.2x0.7 smd mask+0: 1(-9.8,-1.54) 2(-9.8,1.54) 3(-9.4,-1.54) 4(-9.4,1.54) 5(-9,-1.54) 6(-9,1.54) 7(-8.6,-1.54) 8(-8.6,1.54) 9(-8.2,-1.54) 10(-8.2,1.54) 11(-7.8,-1.54) 12(-7.8,1.54) 13(-7.4,-1.54) 14(-7.4,1.54) 15(-7,-1.54) 16(-7,1.54) 17(-6.6,-1.54) 18(-6.6,1.54) 19(-6.2,-1.54) 20(-6.2,1.54) 21(-5.8,-1.54) 22(-5.8,1.54) 23(-5.4,-1.54) 24(-5.4,1.54) 25(-5,-1.54) 26(-5,1.54) 27(-4.6,-1.54) 28(-4.6,1.54) 29(-4.2,-1.54) 30(-4.2,1.54) 31(-3.8,-1.54) 32(-3.8,1.54) 33(-3.4,-1.54) 34(-3.4,1.54) 35(-3,-1.54) 36(-3,1.54) 37(-2.6,-1.54) 38(-2.6,1.54) 39(-2.2,-1.54) 40(-2.2,1.54) 41(-1.8,-1.54) 42(-1.8,1.54) 43(-1.4,-1.54) 44(-1.4,1.54) 45(-1,-1.54) 46(-1,1.54) 47(-0.6,-1.54) 48(-0.6,1.54) 49(-0.2,-1.54) 50(-0.2,1.54) 51(0.2,-1.54) 52(0.2,1.54) 53(0.6,-1.54) 54(0.6,1.54) 55(1,-1.54) 56(1,1.54) 57(1.4,-1.54) 58(1.4,1.54) 59(1.8,-1.54) 60(1.8,1.54) 61(2.2,-1.54) 62(2.2,1.54) 63(2.6,-1.54) 64(2.6,1.54) 65(3,-1.54) 66(3,1.54) 67(3.4,-1.54) 68(3.4,1.54) 69(3.8,-1.54) 70(3.8,1.54) 71(4.2,-1.54) 72(4.2,1.54) 73(4.6,-1.54) 74(4.6,1.54) 75(5,-1.54) 76(5,1.54) 77(5.4,-1.54) 78(5.4,1.54) 79(5.8,-1.54) 80(5.8,1.54) 81(6.2,-1.54) 82(6.2,1.54) 83(6.6,-1.54) 84(6.6,1.54) 85(7,-1.54) 86(7,1.54) 87(7.4,-1.54) 88(7.4,1.54) 89(7.8,-1.54) 90(7.8,1.54) 91(8.2,-1.54) 92(8.2,1.54) 93(8.6,-1.54) 94(8.6,1.54) 95(9,-1.54) 96(9,1.54) 97(9.4,-1.54) 98(9.4,1.54) 99(9.8,-1.54) 100(9.8,1.54)
Top Overlay:
  lines w0.2: -10.275,-1.57 -11.4,-1.57 -11.4,1.57 -10.275,1.57 ; 10.275,-1.57 11.4,-1.57 11.4,1.57 10.275,1.57
  text "2" at -10,2.3 h0.55
  text "1" at -9.9,-2.8 h0.55
  text "99" at 9.3,-2.8 h0.55
  text "100" at 9.2,2.3 h0.55
Mechanical 15:
  lines w0.15: -0.5,0 0,0 ; 0,-0.5 0,0 ; 0,0.5 0,0 ; 0.5,0 0,0 ; -11.6,-1.99 11.6,-1.99 11.6,1.99 -11.6,1.99 -11.6,-1.99
  text "1" at -9.9,-1.6 h0.55
  text "2" at -10,1.1 h0.55
  text "100" at 9.1,1.1 h0.55
  text "99" at 9.2,-1.6 h0.55
  text ".Designator" at 0,0 h0.55
3D body "DF40C-100DS.stp": height 1.4, standoff -0.05, extent -11.3,-1.69 11.3,1.69

## FP-DF40HC_3_0_-100DS-0_4V-MFG [mm]
pads (100):
  rect 0.2x0.7 smd mask+0: 1(-9.8,-1.54) 2(-9.8,1.54) 3(-9.4,-1.54) 4(-9.4,1.54) 5(-9,-1.54) 6(-9,1.54) 7(-8.6,-1.54) 8(-8.6,1.54) 9(-8.2,-1.54) 10(-8.2,1.54) 11(-7.8,-1.54) 12(-7.8,1.54) 13(-7.4,-1.54) 14(-7.4,1.54) 15(-7,-1.54) 16(-7,1.54) 17(-6.6,-1.54) 18(-6.6,1.54) 19(-6.2,-1.54) 20(-6.2,1.54) 21(-5.8,-1.54) 22(-5.8,1.54) 23(-5.4,-1.54) 24(-5.4,1.54) 25(-5,-1.54) 26(-5,1.54) 27(-4.6,-1.54) 28(-4.6,1.54) 29(-4.2,-1.54) 30(-4.2,1.54) 31(-3.8,-1.54) 32(-3.8,1.54) 33(-3.4,-1.54) 34(-3.4,1.54) 35(-3,-1.54) 36(-3,1.54) 37(-2.6,-1.54) 38(-2.6,1.54) 39(-2.2,-1.54) 40(-2.2,1.54) 41(-1.8,-1.54) 42(-1.8,1.54) 43(-1.4,-1.54) 44(-1.4,1.54) 45(-1,-1.54) 46(-1,1.54) 47(-0.6,-1.54) 48(-0.6,1.54) 49(-0.2,-1.54) 50(-0.2,1.54) 51(0.2,-1.54) 52(0.2,1.54) 53(0.6,-1.54) 54(0.6,1.54) 55(1,-1.54) 56(1,1.54) 57(1.4,-1.54) 58(1.4,1.54) 59(1.8,-1.54) 60(1.8,1.54) 61(2.2,-1.54) 62(2.2,1.54) 63(2.6,-1.54) 64(2.6,1.54) 65(3,-1.54) 66(3,1.54) 67(3.4,-1.54) 68(3.4,1.54) 69(3.8,-1.54) 70(3.8,1.54) 71(4.2,-1.54) 72(4.2,1.54) 73(4.6,-1.54) 74(4.6,1.54) 75(5,-1.54) 76(5,1.54) 77(5.4,-1.54) 78(5.4,1.54) 79(5.8,-1.54) 80(5.8,1.54) 81(6.2,-1.54) 82(6.2,1.54) 83(6.6,-1.54) 84(6.6,1.54) 85(7,-1.54) 86(7,1.54) 87(7.4,-1.54) 88(7.4,1.54) 89(7.8,-1.54) 90(7.8,1.54) 91(8.2,-1.54) 92(8.2,1.54) 93(8.6,-1.54) 94(8.6,1.54) 95(9,-1.54) 96(9,1.54) 97(9.4,-1.54) 98(9.4,1.54) 99(9.8,-1.54) 100(9.8,1.54)
Top Overlay:
  lines w0.2: -10.275,-1.57 -11.4,-1.57 -11.4,1.57 -10.275,1.57 ; 10.275,-1.57 11.4,-1.57 11.4,1.57 10.275,1.57
  text "100" at 9.2,2.3 h0.55
  text "99" at 9.3,-2.8 h0.55
  text "1" at -9.9,-2.8 h0.55
  text "2" at -10,2.3 h0.55
Mechanical 15:
  lines w0.15: -0.5,0 0,0 ; 0,-0.5 0,0 ; 0,0.5 0,0 ; 0.5,0 0,0 ; -11.6,-1.99 -11.6,1.99 11.6,1.99 11.6,-1.99 -11.6,-1.99
  text ".Designator" at 0,0 h0.55
  text "99" at 9.2,-1.6 h0.55
  text "100" at 9.1,1.1 h0.55
  text "2" at -10,1.1 h0.55
  text "1" at -9.9,-1.6 h0.55
3D body "Conn_Hirose_DF40HC_3_0_-100DS-0_4V_51_eec.STEP": height 0.25, standoff 0, extent -11.5,-1.99 11.5,1.99

## FPC_CONNECTOR_15pin_1-1734248-5 [mm]
pads (30):
  rect 0.6x2 smd mask+0.05: 1(7,-1.75) 1(7,1.75) 2(6,-1.75) 2(6,1.75) 3(5,-1.75) 3(5,1.75) 4(4,-1.75) 4(4,1.75) 5(3,-1.75) 5(3,1.75) 6(2,-1.75) 6(2,1.75) 7(1,-1.75) 7(1,1.75) 8(0,-1.75) 8(0,1.75) 9(-1,-1.75) 9(-1,1.75) 10(-2,-1.75) 10(-2,1.75) 11(-3,-1.75) 11(-3,1.75) 12(-4,-1.75) 12(-4,1.75) 13(-5,-1.75) 13(-5,1.75) 14(-6,-1.75) 14(-6,1.75) 15(-7,-1.75) 15(-7,1.75)
Top Overlay:
  lines w0.15: -7.5,-1.5 -11,-1.5 -11,1.5 -7.5,1.5 ; 7.5,-1.5 11,-1.5 11,1.5 7.5,1.5
  text "1" at 7.7,2 h0.55
  text "1" at 7.7,-2.8 h0.55
  text "15" at -8.9,2 h0.55
  text "15" at -8.9,-2.8 h0.55
Mechanical 15:
  lines w0.15: -0.5,0 0.5,0 ; 0,-0.5 0,0.5 ; -11.5,-3 11.5,-3 11.5,3 -11.5,3 -11.5,-3
  text ".Designator" at 0,-0.2 h0.55
  text "1" at 7.5,1.5 h0.55
  text "15" at -8.5,1.5 h0.55
  text "15" at -8.5,-2 h0.55
  text "1" at 7.5,-2 h0.55
3D body "c-1-1734248-5-e-3d.stp": height 5.68, standoff 0, extent -11.2,-2.45 11.2,2.4

## FPF3042 [mm]
pads (16):
  round 0.2 smd mask+0.05: A1(-0.6,0.6) A2(-0.2,0.6) A3(0.2,0.6) A4(0.6,0.6) B1(-0.6,0.2) B2(-0.2,0.2) B3(0.2,0.2) B4(0.6,0.2) C1(-0.6,-0.2) C2(-0.2,-0.2) C3(0.2,-0.2) C4(0.6,-0.2) D1(-0.6,-0.6) D2(-0.2,-0.6) D3(0.2,-0.6) D4(0.6,-0.6)
Top Overlay:
  circle w0.1: c-1.15,0.625 r0.05
  lines w0.15: -0.9,-0.9 -0.9,0.9 0.9,0.9 0.9,-0.9 -0.9,-0.9
Mechanical 15:
  circle w0.1: c-0.6,0.6 r0.05
  lines w0.1: -0.25,0 0,0 ; 0,-0.25 0,0 ; 0,0.25 0,0 ; 0.25,0 0,0
  lines w0.15: -0.9,-0.9 -0.9,0.9 0.9,0.9 0.9,-0.9 -0.9,-0.9
  text ".Designator" at 0,0 h0.55
3D body: height 1.5, standoff 0, extent -0.8,-0.8 0.8,0.8

## FSA2257L10X_SPDT_SW_10MICROPAK [mm]
pads (10):
  rect 0.35x0.25 smd mask+0.05: 1(-0.56,0.75) 2(-0.56,0.25) 3(-0.56,-0.25) 4(-0.56,-0.75) 6(0.56,-0.75) 7(0.56,-0.25) 8(0.56,0.25) 9(0.56,0.75)
  rect 0.25x0.35 smd mask+0.05: 5(0,-0.81) 10(0,0.81)
Top Layer keep-out:
  region: -0.25,0.475 0.25,0.475 0.25,-0.475 -0.25,-0.475
Top Overlay:
  circle w0.2: c-1.175,0.775 r0.025
  lines w0.15: -0.9,-1.15 -0.9,1.15 0.9,1.15 0.9,-1.15 -0.9,-1.15
Mechanical 15:
  circle w0.2: c-0.55,0.75 r0.025
  lines w0.15: -0.375,0 0,0 ; 0,-0.375 0,0 ; 0,0.375 0,0 ; 0.375,0 0,0 ; -0.9,-1.15 0.9,-1.15 0.9,1.15 -0.9,1.15 -0.9,-1.15
  text ".Designator" at 0,0 h0.55
3D body: height 0.55, standoff 0, extent -0.8,-1.05 0.8,1.05

## FSUSB42UMX [mm]
pads (10):
  rect 0.91x0.22 smd mask+0.03: 1(-0.6,0.2)
  rect 0.81x0.22 smd mask+0.03: 2(-0.65,-0.2) 6(0.65,-0.2) 7(0.65,0.2)
  rect 0.22x0.75 smd mask+0.03: 3(-0.4,-0.85) 4(0,-0.85) 5(0.4,-0.85) 8(0.4,0.85) 9(0,0.85) 10(-0.4,0.85)
Top Overlay:
  region: -0.75,1.275 -1.075,1.275 -1.075,1 -1.05,0.975
  lines w0.15: -1.075,-0.675 -1.075,-1.275 -0.75,-1.275 ; -1.075,0.675 -1.075,1.275 -0.75,1.275 -1.05,0.975 ; 0.75,-1.275 1.075,-1.275 1.075,-0.675 ; 0.75,1.275 1.075,1.275 1.075,0.675
Mechanical 15:
  circle w0.15: c-0.75,0.225 r0.056
  lines w0.15: -0.25,0 0,0 ; 0,-0.25 0,0 ; 0,0.25 0,0 ; 0.25,0 0,0 ; -1.25,-1.45 -1.25,1.45 1.25,1.45 1.25,-1.45 -1.25,-1.45
  text ".Designator" at 0,0 h0.55
3D body: height 0.5, standoff 0, extent -0.7,-0.9 0.7,0.9
3D body: height 0.51, standoff 0.5, extent -0.499,0.5 -0.3,0.7

## FT601Q [mm] "QFN, 76-Leads, Body 9,05x9,05mm, Pitch 0,40mm, Thermal Pad 5,55x5,55mm, IPC High Density"
height 1
pads (77):
  rect 0.9x0.2 smd mask+0.05: 1(-4.5,3.6) 2(-4.5,3.2) 3(-4.5,2.8) 4(-4.5,2.4) 5(-4.5,2) 6(-4.5,1.6) 7(-4.5,1.2) 8(-4.5,0.8) 9(-4.5,0.4) 10(-4.5,0) 11(-4.5,-0.4) 12(-4.5,-0.8) 13(-4.5,-1.2) 14(-4.5,-1.6) 15(-4.5,-2) 16(-4.5,-2.4) 17(-4.5,-2.8) 18(-4.5,-3.2) 19(-4.5,-3.6) 39(4.5,-3.6) 40(4.5,-3.2) 41(4.5,-2.8) 42(4.5,-2.4) 43(4.5,-2) 44(4.5,-1.6) 45(4.5,-1.2) 46(4.5,-0.8) 47(4.5,-0.4) 48(4.5,0) 49(4.5,0.4) 50(4.5,0.8) 51(4.5,1.2) 52(4.5,1.6) 53(4.5,2) 54(4.5,2.4) 55(4.5,2.8) 56(4.5,3.2) 57(4.5,3.6)
  rect 0.2x0.9 smd mask+0.05: 20(-3.6,-4.5) 21(-3.2,-4.5) 22(-2.8,-4.5) 23(-2.4,-4.5) 24(-2,-4.5) 25(-1.6,-4.5) 26(-1.2,-4.5) 27(-0.8,-4.5) 28(-0.4,-4.5) 29(0,-4.5) 30(0.4,-4.5) 31(0.8,-4.5) 32(1.2,-4.5) 33(1.6,-4.5) 34(2,-4.5) 35(2.4,-4.5) 36(2.8,-4.5) 37(3.2,-4.5) 38(3.6,-4.5) 58(3.6,4.5) 59(3.2,4.5) 60(2.8,4.5) 61(2.4,4.5) 62(2,4.5) 63(1.6,4.5) 64(1.2,4.5) 65(0.8,4.5) 66(0.4,4.5) 67(0,4.5) 68(-0.4,4.5) 69(-0.8,4.5) 70(-1.2,4.5) 71(-1.6,4.5) 72(-2,4.5) 73(-2.4,4.5) 74(-2.8,4.5) 75(-3.2,4.5) 76(-3.6,4.5)
  rect 5.55x5.55 smd: 77(0,0)
via -2.2,2.2 diameter 0.5 hole 0.2
via -1.1,2.2 diameter 0.5 hole 0.2
via 0,2.2 diameter 0.5 hole 0.2
via 1.1,2.2 diameter 0.5 hole 0.2
via 2.2,2.2 diameter 0.5 hole 0.2
via -2.2,1.1 diameter 0.5 hole 0.2
via -1.1,1.1 diameter 0.5 hole 0.2
via 0,1.1 diameter 0.5 hole 0.2
via 1.1,1.1 diameter 0.5 hole 0.2
via 2.2,1.1 diameter 0.5 hole 0.2
via -2.2,0 diameter 0.5 hole 0.2
via -1.1,0 diameter 0.5 hole 0.2
via 0,0 diameter 0.5 hole 0.2
via 1.1,0 diameter 0.5 hole 0.2
via 2.2,0 diameter 0.5 hole 0.2
via -2.2,-1.1 diameter 0.5 hole 0.2
via -1.1,-1.1 diameter 0.5 hole 0.2
via 0,-1.1 diameter 0.5 hole 0.2
via 1.1,-1.1 diameter 0.5 hole 0.2
via 2.2,-1.1 diameter 0.5 hole 0.2
via -2.2,-2.2 diameter 0.5 hole 0.2
via -1.1,-2.2 diameter 0.5 hole 0.2
via 0,-2.2 diameter 0.5 hole 0.2
via 1.1,-2.2 diameter 0.5 hole 0.2
via 2.2,-2.2 diameter 0.5 hole 0.2
Top Overlay:
  region: -4.675,4.125 -4.7,4.15 -4.7,4.7 -4.1,4.7
  lines w0.2: -4.7,-4.1 -4.1,-4.7 ; 4.1,-4.7 4.7,-4.1 ; 4.1,4.7 4.7,4.1 ; -4.7,4.1 -4.7,4.7 -4.1,4.7 -4.7,4.1
Mechanical 13:
  circle w0.1: c-3.65,3.65 r0.5
  lines w0.1: -4.55,-3.95 -3.95,-4.55 3.95,-4.55 4.55,-3.95 4.55,3.95 3.95,4.55 -3.95,4.55 -4.55,3.95 -4.55,-3.95
Mechanical 15:
  circle w0.4: c-4.475,3.6 r0.035
  lines w0.15: -0.5,0 0.5,0 ; 0,-0.5 0,0.5 ; -5.1,-5.1 -5.1,5.1 5.1,5.1 5.1,-5.1 -5.1,-5.1
  text ".Designator" at 0,0 h0.55
3D body "FT601Q_1.step": height 1, standoff 0, extent -4.56,-4.56 4.56,4.56

## FT2232HL_LQFP-64_M [mm] "Thin QFP, 64-Leads, Body 10x10mm, Pitch 0.5mm, IPC Low Density"
height 1.6
pads (64):
  oval 2.1x0.3 smd mask+0.05: 1(-5.6,3.75) 2(-5.6,3.25) 3(-5.6,2.75) 4(-5.6,2.25) 5(-5.6,1.75) 6(-5.6,1.25) 7(-5.6,0.75) 8(-5.6,0.25) 9(-5.6,-0.25) 10(-5.6,-0.75) 11(-5.6,-1.25) 12(-5.6,-1.75) 13(-5.6,-2.25) 14(-5.6,-2.75) 15(-5.6,-3.25) 16(-5.6,-3.75) 33(5.6,-3.75) 34(5.6,-3.25) 35(5.6,-2.75) 36(5.6,-2.25) 37(5.6,-1.75) 38(5.6,-1.25) 39(5.6,-0.75) 40(5.6,-0.25) 41(5.6,0.25) 42(5.6,0.75) 43(5.6,1.25) 44(5.6,1.75) 45(5.6,2.25) 46(5.6,2.75) 47(5.6,3.25) 48(5.6,3.75)
  oval 0.3x2.1 smd mask+0.05: 17(-3.75,-5.6) 18(-3.25,-5.6) 19(-2.75,-5.6) 20(-2.25,-5.6) 21(-1.75,-5.6) 22(-1.25,-5.6) 23(-0.75,-5.6) 24(-0.25,-5.6) 25(0.25,-5.6) 26(0.75,-5.6) 27(1.25,-5.6) 28(1.75,-5.6) 29(2.25,-5.6) 30(2.75,-5.6) 31(3.25,-5.6) 32(3.75,-5.6) 49(3.75,5.6) 50(3.25,5.6) 51(2.75,5.6) 52(2.25,5.6) 53(1.75,5.6) 54(1.25,5.6) 55(0.75,5.6) 56(0.25,5.6) 57(-0.25,5.6) 58(-0.75,5.6) 59(-1.25,5.6) 60(-1.75,5.6) 61(-2.25,5.6) 62(-2.75,5.6) 63(-3.25,5.6) 64(-3.75,5.6)
Top Overlay:
  circle w0.25: c-5.6,4.45 r0.125
  circle w0.6: c-3.15,3.15 r0.3
  lines w0.2: -4.15,-4.15 -4.15,4.15 4.15,4.15 4.15,-4.15 -4.15,-4.15
Mechanical 13:
  circle w0.1: c-4.1,4.1 r0.5
  lines w0.1: -5,-5 -5,5 5,5 5,-5 -5,-5
Mechanical 15:
  circle w0.35: c-5.6,4.5 r0.1
  lines w0.15: -0.5,0 0.5,0 ; 0,-0.5 0,0.5 ; -6.8,-6.8 -6.8,6.8 6.8,6.8 6.8,-6.8 -6.8,-6.8
  text ".Designator" at 0,0 h0.55
3D body "User Library-LQFP-64-1.step": height 1.5, standoff 0, extent -6,-5 6,5
3D body "User Library-LQFP-64-1.step": height 1.45, standoff -0.05, extent -5,-6 5,6

## FUSB340TMX_USB_switch_18-XFQFN [mm]
pads (19):
  rrect50% 0.6x0.2 smd mask+0.05: 1(-0.977,0.8)
  rrect75% 0.6x0.2 smd mask+0.05: 2(-0.977,0.4) 3(-0.977,0) 4(-0.977,-0.4) 5(-0.977,-0.8) 10(0.977,-0.8) 11(0.977,-0.4) 12(0.977,0) 13(0.977,0.4) 14(0.977,0.8)
  rrect75% 0.2x0.6 smd mask+0.05: 6(-0.6,-1.377) 7(-0.2,-1.377) 8(0.2,-1.377) 9(0.6,-1.377) 15(0.6,1.377) 16(0.2,1.377) 17(-0.2,1.377) 18(-0.6,1.377)
  rrect50% 1x1.8 smd mask+0.05: PAD(0,0)
Top Overlay:
  region: -1.4,1.3 -1.4,1.8 -0.9,1.8
  lines w0.15: -1.4,-1.1 -1.4,-1.8 -0.9,-1.8 ; 0.9,-1.8 1.4,-1.8 1.4,-1.1 ; 0.9,1.8 1.4,1.8 1.4,1.1 ; -1.4,1.1 -1.4,1.3 -0.9,1.8 -1.4,1.8 -1.4,1.1
Mechanical 13:
  lines w0.2: -1,-1.4 -1,1.4 1,1.4 1,-1.4 -1,-1.4
Mechanical 15:
  circle w0.2: c-1,0.8 r0.056
  lines w0.1: -0.5,0 0,0 ; 0,-0.5 0,0 ; 0,0.5 0,0 ; 0.5,0 0,0 ; -1.4,-1.8 -1.4,1.8 1.4,1.8 1.4,-1.8 -1.4,-1.8
  text ".Designator" at 0,0 h0.55
3D body "IC_ON_Semiconductor_FUSB340TMX_eec.STEP": height 0.25, standoff 0, extent -1.586,-1.986 1.586,1.986

## FX10B-80S/8-SV [mm]
pads (92):
  rect 0.3x1.6 smd mask+0.05: 1(-11.75,3.061) 2(-11.75,-3.061) 3(-11.25,3.061) 4(-11.25,-3.061) 5(-10.75,3.061) 6(-10.75,-3.061) 7(-10.25,3.061) 8(-10.25,-3.061) 9(-9.75,3.061) 10(-9.75,-3.061) 11(-8.24,3.061) 12(-8.24,-3.061) 13(-7.75,3.061) 14(-7.75,-3.061) 15(-7.25,3.061) 16(-7.25,-3.061) 17(-6.75,3.061) 18(-6.75,-3.061) 19(-6.25,3.061) 20(-6.25,-3.061) 21(-5.75,3.061) 22(-5.75,-3.061) 23(-5.25,3.061) 24(-5.25,-3.061) 25(-4.75,3.061) 26(-4.75,-3.061) 27(-4.25,3.061) 28(-4.25,-3.061) 29(-3.75,3.061) 30(-3.75,-3.061) 31(-2.25,3.061) 32(-2.25,-3.061) 33(-1.75,3.061) 34(-1.75,-3.061) 35(-1.25,3.061) 36(-1.25,-3.061) 37(-0.75,3.061) 38(-0.75,-3.061) 39(-0.25,3.061) 40(-0.25,-3.061) 41(0.25,3.061) 42(0.25,-3.061) 43(0.75,3.061) 44(0.75,-3.061) 45(1.25,3.061) 46(1.25,-3.061) 47(1.75,3.061) 48(1.75,-3.061) 49(2.25,3.061) 50(2.25,-3.061) 51(3.75,3.061) 52(3.75,-3.061) 53(4.25,3.061) 54(4.25,-3.061) 55(4.75,3.061) 56(4.75,-3.061) 57(5.25,3.061) 58(5.25,-3.061) 59(5.75,3.061) 60(5.75,-3.061) 61(6.25,3.061) 62(6.25,-3.061) 63(6.75,3.061) 64(6.75,-3.061) 65(7.25,3.061) 66(7.25,-3.061) 67(7.75,3.061) 68(7.75,-3.061) 69(8.25,3.061) 70(8.25,-3.061) 71(9.75,3.061) 72(9.75,-3.061) 73(10.25,3.061) 74(10.25,-3.061) 75(10.75,3.061) 76(10.75,-3.061) 77(11.25,3.061) 78(11.25,-3.061) 79(11.75,3.061) 80(11.75,-3.061)
  rect 0.7x1.6 smd mask+0.05: 81(-9,3.061) 82(-9,-3.061) 83(-3,3.061) 84(-3,-3.061) 85(3,3.061) 86(3,-3.061) 87(9,3.061) 88(9,-3.061)
  round 1 hole 1.19: 89(13.2,0) 90(-13.2,0)
  rect 1.6x3 smd: 89(14.95,0) 90(-14.95,0)
Top Overlay:
  lines w0.254: -16,-0.25 -16,2.5 -14.25,4.25 16,4.25 16,4 16,-4.25 -16,-4.25 -16,0
  text "1" at -11.9,4.7 h0.7
  text "79" at 11.475,4.725 h0.7
Mechanical 15:
  lines w0.15: -16,-0.25 -16,2.5 -14.25,4.25 16,4.25 16,4 16,-4.25 -16,-4.25 -16,0
  lines w0.2: -1,0 0,0 ; 0,-1 0,0 ; 0,1 0,0 ; 1,0 0,0
  text ".Designator" at 0,0 h0.55
3D body "FX10B-80S8-SV.stp": height 3.22, standoff 0.02, extent -15.55,-3.65 15.55,3.65

## FX20-20P-0.5SV15 [mm]
pads (22):
  rect 0.3x1.8 smd mask+0.05: 1(-2.25,-4.15) 2(-1.75,-4.15) 3(-1.25,-4.15) 4(-0.75,-4.15) 5(-0.25,-4.15) 6(0.25,-4.15) 7(0.75,-4.15) 8(1.25,-4.15) 9(1.75,-4.15) 10(2.25,-4.15) 11(-2.25,4.15) 12(-1.75,4.15) 13(-1.25,4.15) 14(-0.75,4.15) 15(-0.25,4.15) 16(0.25,4.15) 17(0.75,4.15) 18(1.25,4.15) 19(1.75,4.15) 20(2.25,4.15)
  rect 3x3.2 smd mask+0.05: 21(8.23,0) 22(-8.23,0)
Top Overlay:
  region: -10,-4 -8.5,-5.5 -10,-5.5
  lines w0.15: -10,-2.5 -10,-5.5 -3,-5.5 ; -10,2.5 -10,5.5 -3,5.5 ; 3,-5.5 10,-5.5 10,-2.5 ; 3,5.5 10,5.5 10,2.5
  text "20" at 3,4.5 h0.55
  text "11" at -3.5,4.5 h0.55
  text "1" at -3,-5 h0.55
  text "10" at 3,-5 h0.55
Mechanical 15:
  lines w0.15: -1,0 1,0 ; 0,-1 0,1 ; -10,-5.5 -10,5.5 10,5.5 10,-5.5 -10,-5.5
  text ".Designator" at 0,0 h0.55
  text "1" at -2.5,-4.5 h0.55
  text "10" at 2.5,-4.5 h0.55
  text "11" at -3,4 h0.55
  text "20" at 2.5,4 h0.55
3D body "FX20-20P-0.5SV15.stp": height 13.2, standoff 0, extent -8.7,-4.75 8.7,4.75

## FX20-20P-0.5SV20 [mm]
pads (22):
  rect 0.3x1.8 smd mask+0.05: 1(-2.25,-4.15) 2(-1.75,-4.15) 3(-1.25,-4.15) 4(-0.75,-4.15) 5(-0.25,-4.15) 6(0.25,-4.15) 7(0.75,-4.15) 8(1.25,-4.15) 9(1.75,-4.15) 10(2.25,-4.15) 11(-2.25,4.15) 12(-1.75,4.15) 13(-1.25,4.15) 14(-0.75,4.15) 15(-0.25,4.15) 16(0.25,4.15) 17(0.75,4.15) 18(1.25,4.15) 19(1.75,4.15) 20(2.25,4.15)
  rect 3x3.2 smd mask+0.05: 21(8.23,0) 22(-8.23,0)
Top Overlay:
  region: -10,-4 -8.5,-5.5 -10,-5.5
  lines w0.15: -10,-2.5 -10,-5.5 -3,-5.5 ; -10,2.5 -10,5.5 -3,5.5 ; 3,-5.5 10,-5.5 10,-2.5 ; 3,5.5 10,5.5 10,2.5
  text "10" at 3,-5 h0.55
  text "1" at -3,-5 h0.55
  text "11" at -3.5,4.5 h0.55
  text "20" at 3,4.5 h0.55
Mechanical 15:
  lines w0.15: -1,0 1,0 ; 0,-1 0,1 ; -10,-5.5 10,-5.5 10,5.5 -10,5.5 -10,-5.5
  text "20" at 2.5,4 h0.55
  text "11" at -3,4 h0.55
  text "10" at 2.5,-4.5 h0.55
  text "1" at -2.5,-4.5 h0.55
  text ".Designator" at 0,0 h0.55
3D body "FX20-20P-0.5SV20.stp": height 18.2, standoff 0, extent -8.7,-4.75 8.7,4.75